# Altium schematic symbol library 6130XX21821_61300821821.SchLib: 1 symbol
Pins are listed as number, name and electrical type; pins without a type are passive.

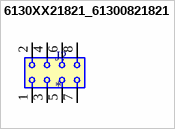
[diagram p0: symbol 6130XX21821_61300821821]

## 6130XX21821_61300821821
designator J?
WR-PHD 2.54 MM DUAL SOCKET HEADE; MF: WÃ¼rth Elektronik; MP: 61300821821; SnapEDA_Link: https://www.snapeda.com/parts/61300821821/W%25C3%25BCrth+Elektronik+Midcom/view-part/?ref=snap; Package: None; Value: *; Check_prices: https://www.snapeda.com/parts/61300821821/W%25C3%25BCrth+Elektronik+Midcom/view-part/?ref=eda
footprint 61300821821
pins: 1, 2, 3, 4, 5, 6, 7, 8